# Altium footprint library PBC02DAAN.PcbLib: 1 footprints
Each footprint in its own frame and in the unit in brackets; x right, y up, seen from the top. Pads: shape width x height; smd on the part's side, far side on the other; paste and mask are expansions set on the pad; w line width, h text height; cw(c..) or ccw(c..) is an arc to the next point about the centre after c.
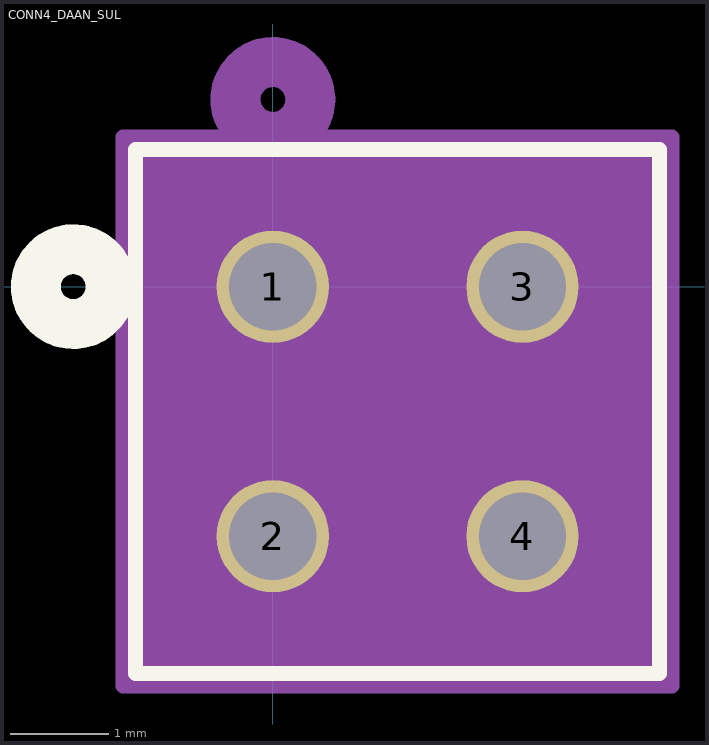
[diagram p0: the footprint, top view; thin cyan lines are the x and y axes]

## CONN4_DAAN_SUL [mil]
pads (4):
  round 45 hole 35 paste-99999 mask+0: 1(0,0) 2(0,-100) 3(100,0) 4(100,-100)
Top Overlay:
  circle w20: c-80,0 r15
  lines w6: -55,-155 -55,55 155,55 155,-155 -55,-155
  text ".Designator" at -87.5,-75 h50
Bottom Overlay:
  circle w20: c-80,0 r15
Mechanical 13:
  circle w20: c0,75 r15
  lines w1: -50,-150 -50,50 150,50 150,-150 -50,-150
  text ".Designator" at -87.5,-75 h50
Mechanical 15:
  region: 160,60 -60,60 -60,-160 160,-160
  lines w6: -60,-160 160,-160 160,60 -60,60 -60,-160
3D body "P%28B%2CC%29C02DAAN (1).stp": height 324.41, standoff -120.08, extent -50,-150 150,50